# Altium schematic symbol library TXU0304QPWRQ1.SchLib: 1 symbol
Pins are listed as number, name and electrical type; pins without a type are passive.

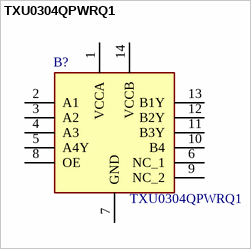
[diagram p0: symbol TXU0304QPWRQ1]

## TXU0304QPWRQ1
designator B?
Voltage Level Translator Unidirectional 1 Circuit 4 Channel 200Mbps TSSOP-14; Manufacturer_Name: Texas Instruments; Geometry.Height: 1.2mm; Mouser Part Number: 595-TXU0304QPWRQ1; Mouser Price/Stock: https://www.mouser.co.uk/ProductDetail/Texas-Instruments/TXU0304QPWRQ1?qs=QNEnbhJQKvZXfjMNvwmKIA%3D%3D; Manufacturer_Part_Number: TXU0304QPWRQ1; Datasheet Link: https://www.ti.com/lit/ds/symlink/txu0304-q1.pdf
footprint SOP65P640X120-14N
pins: 1 VCCA, 2 A1, 3 A2, 4 A3, 5 A4Y, 6 NC_1, 7 GND, 8 OE, 9 NC_2, 10 B4, 11 B3Y, 12 B2Y, 13 B1Y, 14 VCCB